# Altium footprint library IPB_Pcb.PcbLib: 6 footprints
Each footprint in its own frame and in the unit in brackets; x right, y up, seen from the top. Pads: shape width x height; smd on the part's side, far side on the other; paste and mask are expansions set on the pad; w line width, h text height; cw(c..) or ccw(c..) is an arc to the next point about the centre after c.
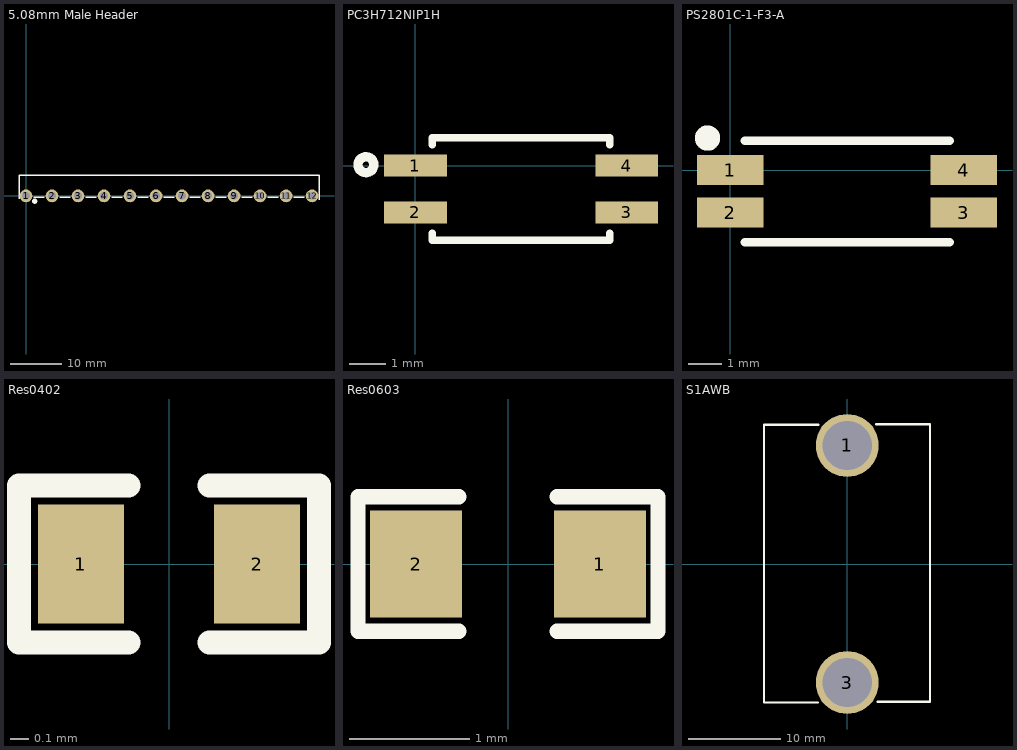
[diagram p0: the footprints below, top view; thin cyan lines are the x and y axes]

## 5.08mm Male Header [mm] "5.08mm right angle single row pin header connector"
pads (12):
  round 2.5 hole 1.5: 1(0,0) 2(5.08,0) 3(10.16,0) 4(15.24,0) 5(20.32,0) 6(25.4,0) 7(30.48,0) 8(35.56,0) 9(40.64,0) 10(45.72,0) 11(50.8,0) 12(55.88,0)
Top Overlay:
  circle w0.5: c1.702,-1.041 r0.254
  lines w0.254: -1.372,-0.584 -1.372,3.988 57.226,3.988 57.226,-0.711 ; 1.499,-0.279 3.556,-0.279 ; 6.579,-0.279 8.636,-0.279 ; 11.659,-0.279 13.716,-0.279 ; 16.739,-0.279 18.796,-0.279 ; 21.819,-0.279 23.876,-0.279 ; 26.899,-0.279 28.956,-0.279 ; 31.979,-0.279 34.036,-0.279 ; 37.059,-0.279 39.116,-0.279 ; 42.139,-0.279 44.196,-0.279 ; 47.219,-0.279 49.276,-0.279 ; 52.299,-0.279 54.356,-0.279
3D body "HTSW-212-08-S-S-RA.stp": height 4.02, standoff -1.31, extent -1.27,-0.273 57.15,9.951

## PC3H712NIP1H [mm] "OPTOISOLATOR TRANSISTOR SMD"
pads (4):
  rect 1.7x0.6 smd: 1(0,0) 2(0,-1.27) 3(5.74,-1.27) 4(5.74,0)
Top Overlay:
  circle w0.254: c-1.346,0.025 r0.216
  lines w0.2: 0.457,-1.829 0.457,-2.032 5.283,-2.032 5.283,-1.829 ; 0.457,0.559 0.457,0.762 5.283,0.762 5.283,0.559
3D body "User Library-ACPL-217-56DE.step": height 2.01, standoff -0.12, extent -0.604,-1.94 6.396,0.66

## PS2801C-1-F3-A [mm]
pads (4):
  rect 2x0.9 smd: 1(0,0) 2(0,-1.27) 3(7,-1.27) 4(7,0)
Top Overlay:
  circle w0.4: c-0.686,0.965 r0.18
  lines w0.254: 0.432,-2.159 6.579,-2.159 ; 0.432,0.889 6.579,0.889
3D body "User Library-SOP-4-1.step": height 2.1, standoff 0, extent 0.107,-2.022 7.107,0.777

## Res0402 [mil]
pads (2):
  rect 18x25 smd: 1(-18.5,0) 2(18.5,0)
Top Overlay:
  lines w5: -8.5,-16.5 -31.5,-16.5 -31.5,16.5 -8.5,16.5 ; 8.5,-16.5 31.5,-16.5 31.5,16.5 8.5,16.5
3D body "User Library-RES_1005-0402.step": height 16.14, standoff 0, extent -22.63,-10.82 22.64,10.83

## Res0603 [mil]
pads (2):
  rect 30x35 smd: 1(30,0) 2(-30,0)
Top Overlay:
  lines w5: -16,-22 -49,-22 -49,22 -16,22 ; 16,-22 49,-22 49,22 16,22
3D body "User Library-RESC1608X05N.step": height 17.76, standoff 0, extent -30.51,-16.73 30.52,16.74

## S1AWB [mm] "Toggle Switch SPST Panel Mount ON-NONE-OFF 20A @ 30VDC, Panel Mount, Solder Lug, IP68 Waterproof"
pads (2):
  round 6.8 hole 5.3: 1(0,12.803) 3(0,-12.803)
Top Overlay:
  lines w0.254: -3.175,-14.961 -8.992,-14.961 -8.992,15.037 -3.15,15.037 ; 3.124,15.113 8.941,15.113 8.941,-14.884 3.277,-14.884
3D body "S1AWB.stp": height 47.9, standoff -5.69, extent -9.017,-14.93 8.992,15.067